# Altium schematic symbol library AO3401A_C15127.SchLib: 1 symbol
Pins are listed as number, name and electrical type; pins without a type are passive.

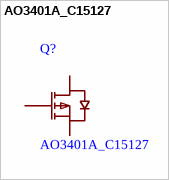
[diagram p0: symbol AO3401A_C15127]

## AO3401A_C15127
designator Q?
1个P沟道 耐压:30V 电流:4A / 数量:1个P沟道 / 漏源电压(Vdss):30V / 连续漏极电流(Id):4A / 导通电阻(RDS(on)):47mΩ@10V；85mΩ@2.5V；60mΩ@4.5V / 耗散功率(Pd):- / 阈值电压(Vgs(th)):900mV / 型号:AO3401A_C15127 / LCSC C15127 / 厂牌:AOS
footprint SOT-23_L2.9-W1.3-P1.90-LS2.4-BR (PCB footprint)
pins: 1 G, 2 S, 3 D